# Altium footprint library Grant_..PcbLib: 97 footprints (part 5 of 7)
Each footprint in its own frame and in the unit in brackets; x right, y up, seen from the top. Pads: shape width x height; smd on the part's side, far side on the other; paste and mask are expansions set on the pad; w line width, h text height; cw(c..) or ccw(c..) is an arc to the next point about the centre after c.
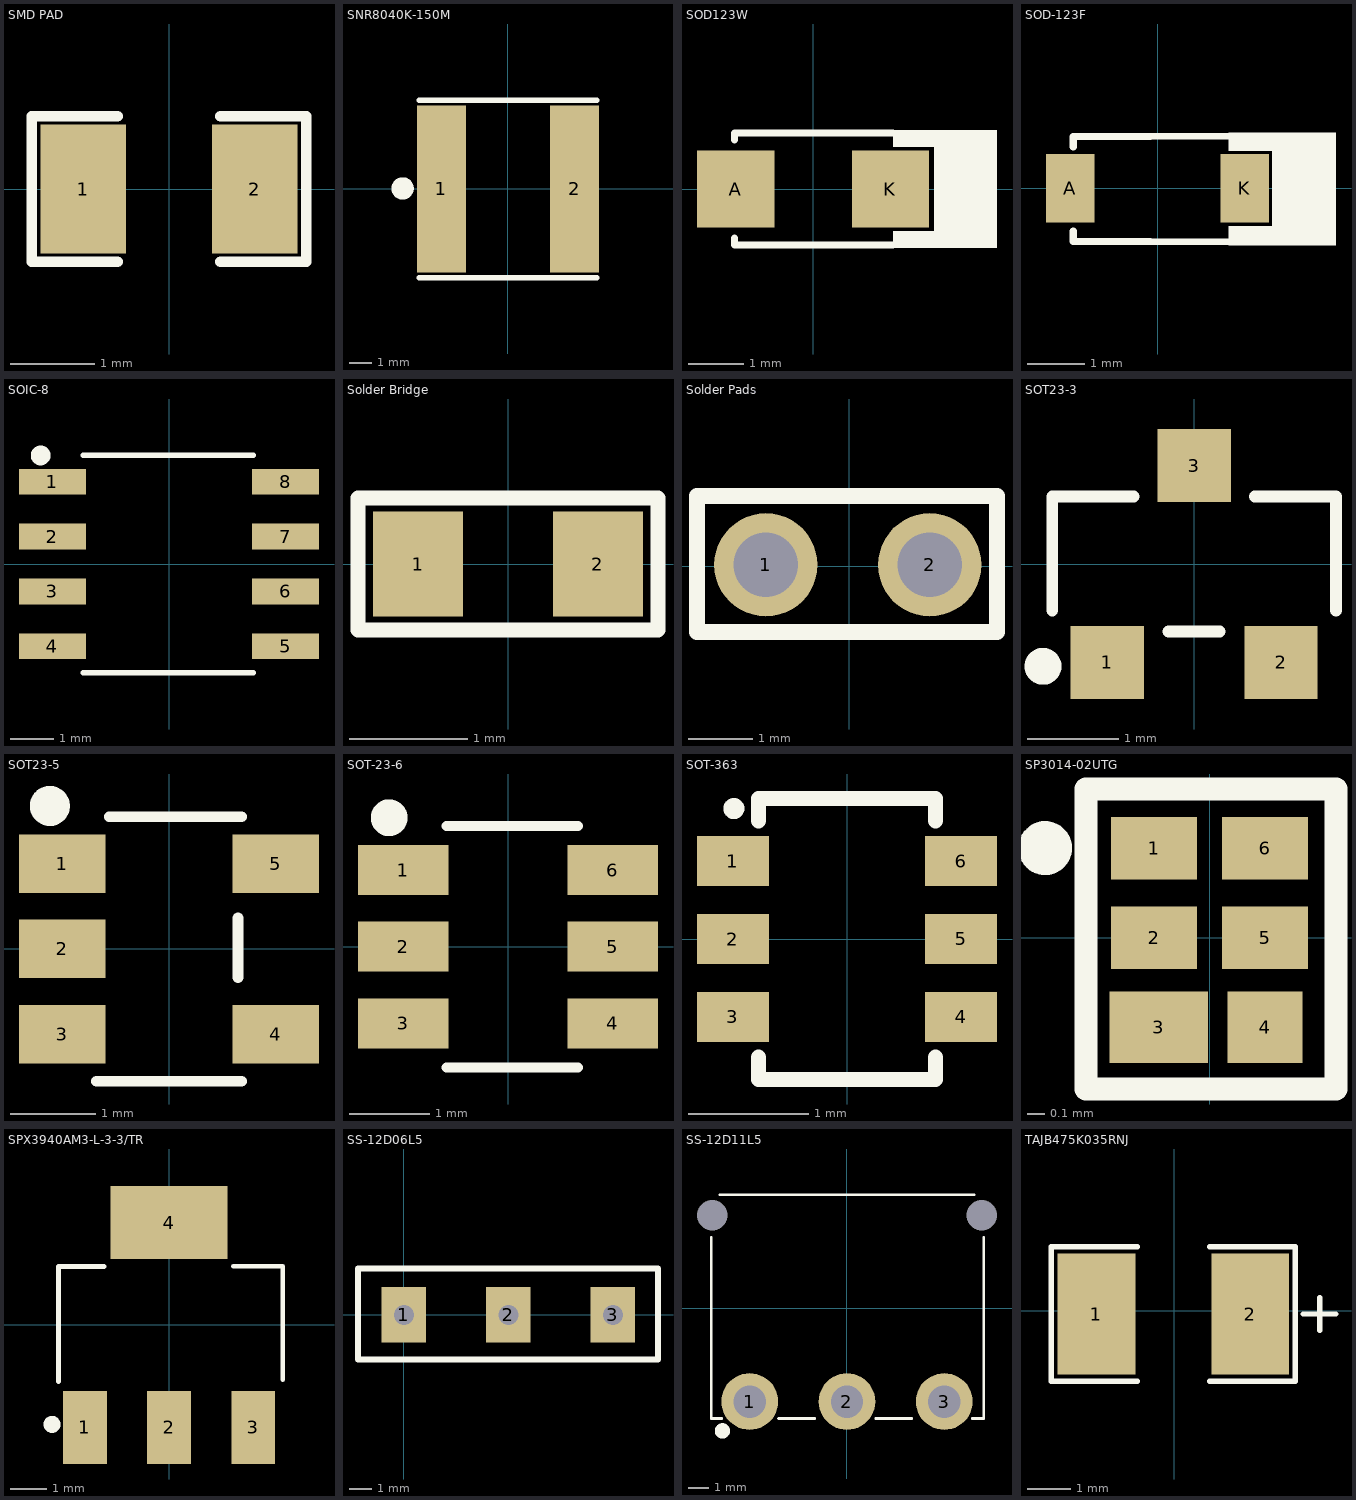
[diagram p4: the footprints below, top view; thin cyan lines are the x and y axes]

## SMD PAD [mil]
pads (2):
  rect 40x60 smd mask+2.76: 1(-40,0) 2(40,0)
Top Overlay:
  lines w5: -24,-34 -64,-34 -64,34 -24,34 ; 24,-34 64,-34 64,34 24,34

## SNR8040K-150M [mm]
pads (2):
  rect 2.22x7.52 smd: 1(-3,0) 2(3,0)
Top Overlay:
  circle w0.5: c-4.75,0.025 r0.254
  lines w0.254: -4,-4 0,-4 4,-4 ; -4,4 0,4 4,4

## SOD123W [mm] "DIODE SCHOTTKY 30V 1A SOD123W"
pads (2):
  rect 1.4x1.4 smd: A(-1.4,0) K(1.4,0)
Top Overlay:
  rectangle: 1.448,-1.067 2.21,-0.762
  rectangle: 1.448,0.762 2.21,1.067
  region: 3.327,1.067 2.184,1.067 2.184,-1.067 3.327,-1.067
  lines w0.127: -1.422,-0.889 -1.422,-1.016 1.448,-1.016 ; -1.422,0.889 -1.422,1.016 1.448,1.016
3D body "User Library-SOD123W.step": height 1.1, standoff -0.01, extent -2,-0.95 2,0.95

## SOD-123F [mm]
pads (2):
  rect 0.85x1.2 smd: A(-1.525,0) K(1.525,0)
Top Overlay:
  rectangle: 1.245,-1 2.075,-0.66
  region: 3.121,0.975 2,0.975 2,-1 3.121,-1
  rectangle: 1.245,0.65 2.1,0.975
  lines w0.127: -1.475,-0.75 -1.475,-0.925 1.267,-0.939 ; -1.475,0.725 -1.475,0.9 1.267,0.914
3D body "User Library-SOD123F.step": height 1.2, standoff -0.01, extent -1.875,-0.875 1.875,0.825

## SOIC-8 [mm]
pads (8):
  rect 1.55x0.6 smd: 1(-2.7,1.905) 2(-2.7,0.635) 3(-2.7,-0.635) 4(-2.7,-1.905) 5(2.7,-1.905) 6(2.7,-0.635) 7(2.7,0.635) 8(2.7,1.905)
Top Overlay:
  circle w0.254: c-2.972,2.515 r0.102
  lines w0.127: -1.981,-2.515 1.956,-2.515 ; -1.981,2.515 1.956,2.515
3D body "User Library-SOIC-8-1.STEP": height 1.65, standoff -0.1, extent -3,-2.45 3,2.45

## Solder Bridge [mil] "Solder Bridge ON"
pads (2):
  rect 30x35 smd: 1(-30,0) 2(30,0)
Top Overlay:
  lines w5: -50,-22 50,-22 50,22 -50,22 -50,-22

## Solder Pads [mm] "SMD-0402"
pads (2):
  round 1.6 hole 1: 1(-1.295,0.025) 2(1.245,0.025)
Top Overlay:
  lines w0.254: -2.362,-1.016 -2.362,1.092 2.286,1.092 2.286,-1.016 -2.362,-1.016

## SOT23-3 [mm] "SOT23, 3-Leads, Body 2.9x1.3mm, Pitch 0.95mm, Lead Span 2.3mm - Reverse Pinning, IPC High Density"
height 1.1
pads (3):
  rect 0.8x0.8 smd: 1(-0.95,-1.075) 2(0.95,-1.075) 3(0,1.075)
Top Overlay:
  circle w0.25: c-1.651,-1.118 r0.076
  lines w0.127: -1.55,-0.508 -1.55,0.737 -0.661,0.737 ; -0.28,-0.737 0.279,-0.737 ; 0.66,0.737 1.549,0.737 1.549,-0.508
3D body "CircuitWorks-SOT-23.step": height 1.05, standoff -0.05, extent -1.5,-1.25 1.5,1.25

## SOT23-5 [mil] "SOT23-5 Package"
height 51.18
pads (5):
  rect 40x27 smd: 1(-49.21,39.37) 2(-49.21,0) 3(-49.21,-39.37) 4(49.21,-39.37) 5(49.21,39.37)
Top Overlay:
  circle w10: c-55,66 r4.24
  lines w5: -33.46,-61.02 33.46,-61.02 ; -27.56,61.02 33.46,61.02 ; 31.79,-13.19 31.79,14.37
3D body "User Library-SOT-23-5-1.STEP": height 43.31, standoff -0.06, extent -45.92,-58.19 52.51,59.92

## SOT-23-6 [mm] "IC BAT CHG LI-ION 1 CELL SOT23-6"
pads (6):
  rect 1.12x0.62 smd: 1(-1.3,0.95) 2(-1.3,0) 3(-1.3,-0.95) 4(1.3,-0.95) 5(1.3,0) 6(1.3,0.95)
Top Overlay:
  circle w0.254: c-1.473,1.6 r0.102
  lines w0.127: -0.762,-1.499 0.864,-1.499 ; -0.762,1.499 0.864,1.499
3D body "User Library-SOT23-6-2.step": height 1.44, standoff -0.01, extent -1.4,-1.45 1.4,1.45

## SOT-363 [mm]
pads (6):
  rect 0.6x0.42 smd: 1(-0.95,0.65) 2(-0.95,0) 3(-0.95,-0.65) 4(0.95,-0.65) 5(0.95,0) 6(0.95,0.65)
Top Overlay:
  lines w0.127: -0.919,1.088 cw(c-0.943,1.087) -0.919,1.089 ; -0.737,-0.986 -0.737,-1.171 0.737,-1.171 0.737,-0.986 ; -0.737,0.986 -0.737,1.171 0.737,1.171 0.737,0.986
3D body "SOT363_DIO.step": height 1.09, standoff 0, extent -1.105,-1.105 1.105,1.105

## SP3014-02UTG [mm]
pads (6):
  rect 0.48x0.35 smd: 1(-0.31,0.5) 2(-0.31,0) 5(0.31,0) 6(0.31,0.5)
  rect 0.55x0.4 smd: 3(-0.285,-0.5)
  rect 0.42x0.4 smd: 4(0.31,-0.5)
Top Overlay:
  circle w0.2: c-0.92,0.5 r0.051
  lines w0.127: -0.691,-0.846 0.706,-0.846 0.706,0.83 -0.691,0.83 -0.691,-0.846
3D body "SP3014-02UTG.stp": height 0.65, standoff 0, extent -0.515,-0.8 0.515,0.8

## SPX3940AM3-L-3-3/TR [mm] "IC REG LINEAR 3.3V 1A SOT223"
pads (4):
  rect 1.2x2 smd: 1(-2.3,-2.8) 2(0,-2.8) 3(2.3,-2.8)
  rect 3.2x2 smd: 4(0,2.8)
Top Overlay:
  circle w0.254: c-3.2,-2.718 r0.105
  lines w0.127: -3.023,-1.547 -3.023,1.599 -1.778,1.599 ; 1.753,1.603 3.103,1.603 3.103,-1.498
3D body "SOT-223-3_VAR-AA.step": height 1.81, standoff 0, extent -3.353,-3.645 3.353,3.645

## SS-12D06L5 [mm]
pads (3):
  rect 2x2.5 hole 0.9 square: 1(0,0) 2(4.7,0) 3(9.4,0)
Top Overlay:
  lines w0.254: -2.057,-2.007 11.43,-2.007 11.43,2.083 -2.057,2.083 -2.057,-2.007

## SS-12D11L5 [mm]
pads (5):
  round 2.8 hole 1.6: 1(-4.8,-4.6) 2(0,-4.6) 3(4.8,-4.6)
  round 0 hole 1.5 unplated: MH1(-6.65,4.6) MH2(6.65,4.6)
Top Overlay:
  circle w0.5: c-6.147,-6.045 r0.127
  lines w0.127: -6.706,3.505 -6.706,-5.436 -6.172,-5.436 ; -6.274,5.613 6.274,5.613 ; -3.378,-5.436 -1.6,-5.436 ; 1.422,-5.436 3.2,-5.436 ; 6.172,-5.436 6.756,-5.436 6.756,3.505
3D body "User Library-1103M2S3ABE2.step": height 6.85, standoff -3.15, extent -6.65,-5.389 6.7,10.303

## TAJB475K035RNJ [mil]
pads (2):
  rect 70.87x110 smd: 1(-71,-3) 2(69,-3)
Top Overlay:
  lines w5: -34,-64 -112,-64 -112,58 -34,58 ; 32,-64 110,-64 110,58 32,58 ; 117,-3 147,-3 ; 132,-18 132,12
3D body "User Library-AVX_BCASE.step": height 76.93, standoff -2.99, extent -73.84,-60.68 71.83,54.68